# Altium schematic symbol library ProjectSymbols.SchLib: 14 symbols
Pins are listed as number, name and electrical type; pins without a type are passive.

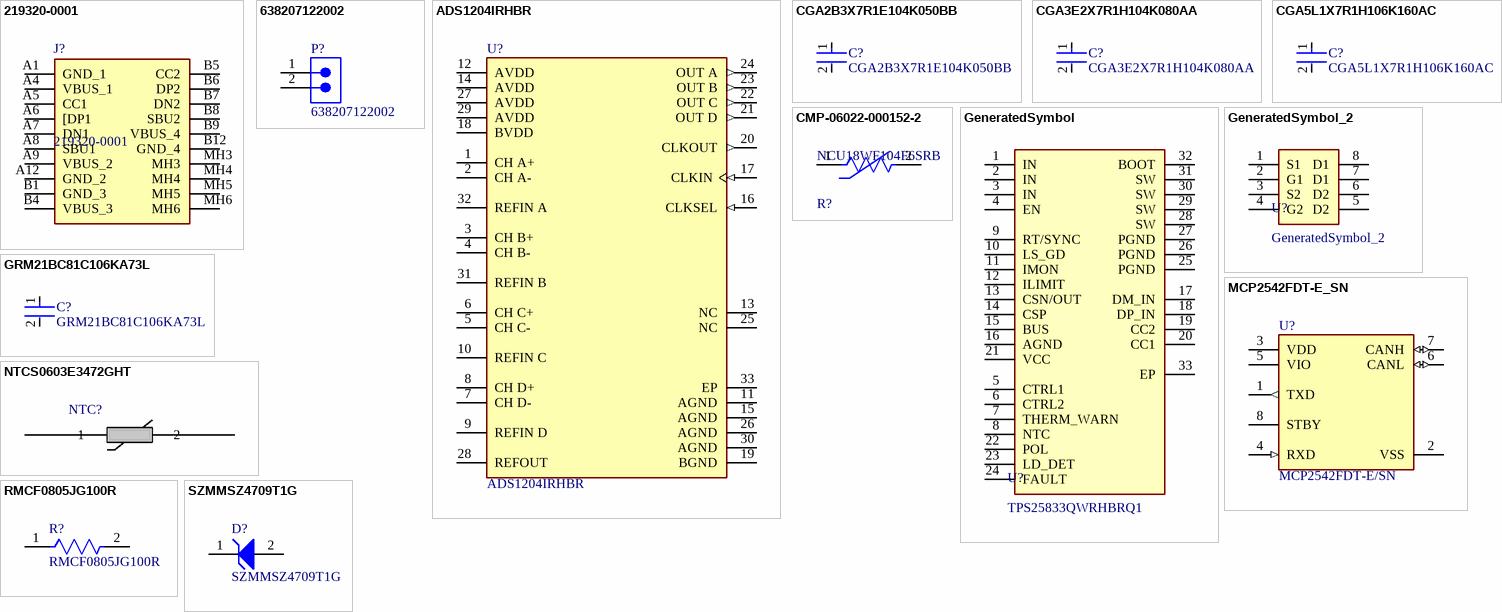
[diagram p0: symbols 219320-0001 to SZMMSZ4709T1G]

## 219320-0001
designator J?
Universal Serial Bus (USB) Shielded I/O Receptacle, Type C, Vertical, Surface Mount, Height 8.8mm, 16 Circuits, Gold (Au) Flash Plating; Manufacturer_Name: Molex; Geometry.Height: 9.05mm; Mouser Part Number: 538-219320-0001; Mouser Price/Stock: https://www.mouser.co.uk/ProductDetail/Molex/219320-0001?qs=rQFj71Wb1eXha8qVBIXu3A%3D%3D; Manufacturer_Part_Number: 219320-0001; Datasheet Link: https://www.molex.com/content/dam/molex/molex-dot-com/products/automated/en-us/salesdrawingpdf/219/219320/2193200001_sd.pdf?inline
footprint 2193200001
pins: A1 GND_1, A4 VBUS_1, A5 CC1, A6 [DP1, A7 DN1, A8 SBU1, A9 VBUS_2, A12 GND_2, B1 GND_3, B4 VBUS_3, B5 CC2, B6 DP2, B7 DN2, B8 SBU2, B9 VBUS_4, B12 GND_4, MH3, MH4, MH5, MH6

## 638207122002
designator P?
Conn, R/A Hdr, Stamped Tab, 2P, 5.08Mm Rohs Compliant: Yes; Gender: Male
footprint 638207122002 (Conn, R/A Hdr, Stamped Tab, 2P, 5.08Mm Rohs Compliant: Yes)
pins: 1, 2

## ADS1204IRHBR
designator U?
IC MODULATOR 16BIT 40K 32VQFN; Differential Nonlinearity: 1LSB; Power Dissipation: 122mW; Sampling Rate: 40000S/s; Interface: Serial; Supply Type: Analog; Max Supply Voltage (DC): 5.5V; Max Power Dissipation: 150mW; Nominal Supply Current: 22.5mA; Number of Inputs: 4; Polarity: Bipolar; Signal to Noise Ratio (SNR): 89dB; Number of Bits: 16; Conversion Rate: 40KS/s; Max Supply Voltage: 5.25V; Integral Nonlinearity (INL): 3LSB; Spurious-free dynamic range (SFDR): 100dB; Resolution: 16b; Min Supply Voltage (DC): 2.7V; Input Type: DIFFERENTIAL; Min Supply Voltage: 4.75V; Packaging: Tape and Reel; Number of Pins: 32; Case/Package: VQFN; Package Quantity: 3000; Min Operating Temperature: -40°C; Number of A/D Converters: 4; RoHS Compliant: Yes; Series: -; Radiation Hardening: No; Power Consumption: 122mW; Lead Free: Lead Free; Max Operating Temperature: 105°C; Number of Channels: 4; Contact Plating: Gold; Number of Analog Inputs: 4; Number of Converters: 4
footprint FP-RHB0032D-MFG
footprint FP-RHB0032D-IPC_C
footprint FP-RHB0032D-IPC_B
footprint FP-RHB0032D-IPC_A
pins: 1 CH A+, 2 CH A-, 3 CH B+, 4 CH B-, 5 CH C-, 6 CH C+, 7 CH D-, 8 CH D+, 9 REFIN D, 10 REFIN C, 11 AGND (power), 12 AVDD (power), 13 NC, 14 AVDD (power), 15 AGND (power), 16 CLKSEL (in), 17 CLKIN (in), 18 BVDD (power), 19 BGND (power), 20 CLKOUT (out), 21 OUT D (out), 22 OUT C (out), 23 OUT B (out), 24 OUT A (out), 25 NC, 26 AGND (power), 27 AVDD (power), 28 REFOUT, 29 AVDD (power), 30 AGND (power), 31 REFIN B, 32 REFIN A, 33 EP (power)

## CGA2B3X7R1E104K050BB
designator C?
Cap Ceramic 100nF 25V X7R 10% Pad SMD 0402 +125°C Automotive T/R; Lead Free: Lead Free; Termination: SMD/SMT; Voltage Rating: 25V; Voltage: 25V; Composition: Ceramic; Case/Package: 0402; Mount: Surface Mount; Voltage Rating (DC): 25V; Tolerance: 10%; Length: 1mm; Width: 0.02inch; REACH SVHC: No SVHC; Max Operating Temperature: 125°C; Case Code (Metric): 1005; Case Code (Imperial): 0402; Package Quantity: 1; Depth: 0.5mm; Min Operating Temperature: -55°C; Thickness: 0.022inch; Capacitance: 100nF; Height: 0.5mm; Dielectric: X7R; Packaging: Tape and Reel; Weight: 2.3E-05oz; Ratings: AEC-Q200
footprint FP-CGA2B-IPC_B
footprint FP-CGA2B-IPC_C
footprint FP-CGA2B-IPC_A
footprint FP-CGA2B-MFG
pins: 1, 2

## CGA3E2X7R1H104K080AA
designator C?
Cap Ceramic 100nF 50V X7R 10% Pad SMD 0603 +125°C Automotive T/R; Weight: 7.1E-05oz; Composition: Ceramic; Max Operating Temperature: 125°C; Termination: SMD/SMT; Dielectric: X7R; Length: 1.6mm; Package Quantity: 1; REACH SVHC: No SVHC; Lead Free: Lead Free; Case Code (Metric): 1608; Min Operating Temperature: -55°C; Packaging: Tape and Reel; Tolerance: 10%; Voltage Rating: 50V; Case Code (Imperial): 0603; Capacitance: 100nF; Case/Package: 0603; Voltage Rating (DC): 50V; Depth: 0.8mm; Radiation Hardening: No; Ratings: AEC-Q200; Mount: Surface Mount; Voltage: 50V; Thickness: 0.035inch; Width: 0.8mm; Height: 0.8mm
footprint FP-CGA3E-0_3-0_1-IPC_A
footprint FP-CGA3E-0_3-0_1-IPC_C
footprint FP-CGA3E-0_3-0_1-IPC_B
footprint FP-CGA3E-0_3-0_1-MFG
pins: 1, 2

## CGA5L1X7R1H106K160AC
designator C?
Cap Ceramic 10uF 50V X7R 10% Pad SMD 1206 +125°C Automotive T/R; Voltage Rating: 50V; Capacitance: 10uF; Case/Package: 1206; Ratings: AEC-Q200; Mount: Surface Mount; Max Operating Temperature: 125°C; Min Operating Temperature: -55°C; Tolerance: 10%; Packaging: Tape and Reel; Case Code (Metric): 3216; Case Code (Imperial): 1206
footprint FP-CGA5L-0_3-0_1-MFG
footprint FP-CGA5L-0_3-0_1-IPC_B
footprint FP-CGA5L-0_3-0_1-IPC_A
footprint FP-CGA5L-0_3-0_1-IPC_C
pins: 1, 2

## CMP-06022-000152-2
designator R?, comment NCU18WF104F6SRB
THERMISTOR NTC; Max Operating Temperature: 150°C; RoHS Compliant: Yes; Min Operating Temperature: -40°C; REACH SVHC: No SVHC; Case Code (Imperial): 0603; Case Code (Metric): 1608
footprint FP-NCU18-0_15-MFG
footprint FP-NCU18-0_15-IPC_A
footprint FP-NCU18-0_15-IPC_C
footprint FP-NCU18-0_15-IPC_B
pins: 1, 2

## GeneratedSymbol
designator U?, comment TPS25833QWRHBRQ1
USB Type-C and BC1.2 5V 3.5A Output 36V Input Synchronous DC/DC Regulator 32-Pin VQFN; Manufacturer: Texas Instruments; Manufacturer Lifecycle Status: ACTIVE; Supplier: Arrow Electronics; Supplier Part Number: TPS25833QWRHBRQ1; Manufacturer Part Number: TPS25833QWRHBRQ1; RoHS: Compliant; Category: USB Interface ICs; Stock: 3000; Pricing: 3000=2.35 (USD); Case/Package: VQFN; Height: 1mm; Length: 5mm; Lifecycle Status: Production; Pins: 32; Schedule B: 8542390000|8542390000; Thickness: 900µm; Width: 5mm; ComponentLink1URL: https://octopart.com:443/opatz8j6/c1?t=QdtQ_5y6OoYO10vGMBHo0MkWWNg3WZcKByxVKRKibkrIArPmB0huZ0PTWgiVQyVM0r-KErAlqgl_GtZqS-zfbTH9MSEVf23tu6zsP7SwoH3cElgJzC1njavEoiPtv5zJyzI5TugnKjD-MwQN_tWNq7D4zs4hg9Jvnjhyur9u1VAzxy-x97OLvkn3T5o38e-A3hbTv1voPLaqbRoeq4uSWuj4oXJZ_6x5obgH2QuRMC6C-RM4You7UXlmIiUE0xXQlfjdTdGh5Mzji6m775kF51dkfg-oVXXT7eQkakUfxTXIZTGRZ9S2Te6OgLonkCf4Q48jzw2hIzpT3B6kxxuzoKhvga5DM2Eb2fh4XFQ3zjw1DN_Mg95a_8n3WVcIjlOyBCLqgiEN8_34Bg&src-supplier=Texas+Instruments; ComponentLink1Description: https://octopart.com:443/opatz8j6/c1?t=QdtQ_5y6OoYO10vGMBHo0MkWWNg3WZcKByxVKRKibkrIArPmB0huZ0PTWgiVQyVM0r-KErAlqgl_GtZqS-zfbTH9MSEVf23tu6zsP7SwoH3cElgJzC1njavEoiPtv5zJyzI5TugnKjD-MwQN_tWNq7D4zs4hg9Jvnjhyur9u1VAzxy-x97OLvkn3T5o38e-A3hbTv1voPLaqbRoeq4uSWuj4oXJZ_6x5obgH2QuRMC6C-RM4You7UXlmIiUE0xXQlfjdTdGh5Mzji6m775kF51dkfg-oVXXT7eQkakUfxTXIZTGRZ9S2Te6OgLonkCf4Q48jzw2hIzpT3B6kxxuzoKhvga5DM2Eb2fh4XFQ3zjw1DN_Mg95a_8n3WVcIjlOyBCLqgiEN8_34Bg&src-supplier=Texas+Instruments; ComponentLink2URL: https://datasheet.octopart.com:443/TPS25833QWRHBRQ1-Texas-Instruments-datasheet-165812046.pdf?src-supplier=SHENGYU+ELECTRONICS; ComponentLink2Description: https://datasheet.octopart.com:443/TPS25833QWRHBRQ1-Texas-Instruments-datasheet-165812046.pdf?src-supplier=SHENGYU+ELECTRONICS; ComponentLink3URL: http://sigma.octopart.com:80/reach_statement/Texas-Instruments-company-64.pdf?src-supplier=Compliance+Statements; ComponentLink3Description: http://sigma.octopart.com:80/reach_statement/Texas-Instruments-company-64.pdf?src-supplier=Compliance+Statements; ComponentLink4URL: http://sigma.octopart.com:80/conflict_mineral_statement/Texas-Instruments-company-63.pdf?src-supplier=Compliance+Statements; ComponentLink4Description: http://sigma.octopart.com:80/conflict_mineral_statement/Texas-Instruments-company-63.pdf?src-supplier=Compliance+Statements
footprint FP-RHB0032D-IPC_A
footprint FP-RHB0032D-IPC_B
footprint FP-RHB0032D-IPC_C
footprint FP-RHB0032D-MFG
pins: 1 IN, 2 IN, 3 IN, 4 EN, 5 CTRL1, 6 CTRL2, 7 THERM_WARN, 8 NTC, 9 RT/SYNC, 10 LS_GD, 11 IMON, 12 ILIMIT, 13 CSN/OUT, 14 CSP, 15 BUS, 16 AGND, 17 DM_IN, 18 DP_IN, 19 CC2, 20 CC1, 21 VCC, 22 POL, 23 LD_DET, 24 FAULT, 25 PGND, 26 PGND, 27 PGND, 28 SW, 29 SW, 30 SW, 31 SW, 32 BOOT, 33 EP

## GeneratedSymbol_2
designator U?
pins: 1 S1, 2 G1, 3 S2, 4 G2, 5 D2, 6 D2, 7 D1, 8 D1

## GRM21BC81C106KA73L
designator C?
Chip Multilayer Ceramic Capacitors for General Purpose, 0805, 10uF, X6S, 22%, 10%, 16V; Material: Ceramic; Thickness: 0.053inch; Packaging: Tape and Reel; Width: 1.25mm; REACH SVHC: No SVHC; Depth: 1.25mm; Case Code (Metric): 2012; Capacitance: 10uF; Max Operating Temperature: 105°C; Lead Free: Lead Free; Case Code (Imperial): 0805; Min Operating Temperature: -55°C; Voltage: 16V; Radiation Hardening: No; Termination: SMD/SMT; Voltage Rating: 16V; Tolerance: 10%; Package Quantity: 1; Voltage Rating (DC): 16V; Case/Package: 0805; Dielectric: X6S; Height: 1.25mm; Mount: Surface Mount; Length: 2mm
footprint FP-GRM21B-0_15-MFG
footprint FP-GRM21B-0_15-IPC_C
footprint FP-GRM21B-0_15-IPC_B
footprint FP-GRM21B-0_15-IPC_A
pins: 1, 2

## MCP2542FDT-E_SN
designator U?, comment MCP2542FDT-E/SN
IC TRANSCEIVER 1/1 8SOIC; Data Rate: 8Mbps; Receiver Hysteresis: 200mV; Min Operating Temperature: -40°C; Mount: Surface Mount; Case/Package: SOIC; Max Operating Temperature: 125°C; Packaging: Rail/Tube
footprint FP-C04-057-SN-IPC_C
footprint FP-C04-057-SN-MFG
footprint FP-C04-057-SN-IPC_B
footprint FP-C04-057-SN-IPC_A
pins: 1 TXD (out), 2 VSS (power), 3 VDD (power), 4 RXD (in), 5 VIO (power), 6 CANL (io), 7 CANH (io), 8 STBY

## NTCS0603E3472GHT
designator NTC?  (value not drawn)
NTCS0603E3472GHT Thermistor NTC 4.7K Ohm 2% 2-Pin 0603 Surface Mount Solder Pad 3830K -4.5 to -4 T/R Automotive; NexarPartId: 44325454; Accuracy: 1%; Resistance: 4.7kΩ; Power Rating: 125mW; Min Operating Temperature: -40°C; Case Code (Imperial): 0603; Packaging: Digi-Reel®; Mount: Surface Mount; Length: 1.6mm; Number of Pins: 2; Case Code (Metric): 1608; RoHS: Compliant; Tolerance: 2%; Contact Plating: Tin; Radiation Hardening: No; Schedule B: 8533400080, 8533400080; Termination: SMD/SMT; Max Operating Temperature: 150°C; Depth: 800µm; Case/Package: 0603; Max Power Dissipation: 125mW
footprint NTCS0603_VIS (Thermistor NTC 1kOhm 3% 2-Pin 0603 Paper T/R)
pins: 1, 2

## RMCF0805JG100R
designator R?
100Ω ±5% 0.125W 0805 Thick Film Chip Resistor AEC-Q200 compliant; Resistance: 100R; Temperature Coefficient: 200ppm/°C; Max Power Dissipation: 125mW; Case Code (Imperial): 0805; Width: 0.049inch; Resistor Type: Thick Film; Height: 0.026inch; Radiation Hardening: No; Series: RMCF; Number of Terminations: 2; Packaging: Tape and Reel; Length: 0.079inch; RoHS Compliant: Yes; Features: Automotive AEC-Q200; Case Code (Metric): 2012; Tolerance: 5%; Max Operating Temperature: 155°C; Min Operating Temperature: -55°C; Mount: Surface Mount; Contact Plating: Tin; Case/Package: 0805
footprint FP-RMCF0805-MFG
footprint FP-RMCF0805-IPC_B
footprint FP-RMCF0805-IPC_C
footprint FP-RMCF0805-IPC_A
pins: 1, 2

## SZMMSZ4709T1G
designator D?
Zener Voltage Regulator, 500 mW, 2-Pin SOD-123, Pb-Free, Tape and Reel; Manufacturer: On Semiconductor; P Max (W): 0.5; VZ Typ (V): 24; RoHS: Pb-Free; DatasheetVersion: Rev. 9; ComponentLink3URL: http://www.onsemi.com/pub_link/Collateral/425-04.PDF; PackageVersion: Rev. G, 10/2009; ComponentLink1Description: Manufacturer URL; Packing: Tape and Reel; PackageReference: SOD-123-2-425-04; ComponentLink2URL: http://www.onsemi.com/pub_link/Collateral/MMSZ4678T1-D.PDF; Mounting Technology: Surface Mount; PackageDescription: 2-Pin SOD, Body 1.6 x 2.69 mm; PartNumber: SZMMSZ4709T1G; ComponentLink1URL: http://www.onsemi.com/; ComponentLink3Description: Package Specification; ComponentLink2Description: Datasheet
footprint ONSC-SOD-123-2-425-04_V (SOD, 2-Leads, Body 2.69x1.6mm)
pins: 1 K, 2 A